# Altium schematic symbol library SM712PTCT.SchLib: 1 symbol
Pins are listed as number, name and electrical type; pins without a type are passive.

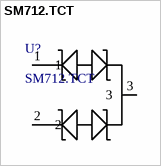
[diagram p0: symbol SM712.TCT]

## SM712.TCT
designator U?
Description; Manufacturer_Name: Semtech; Copyright: Copyright (C) 2025 Ultra Librarian. All rights reserved.; Manufacturer_Part_Number: SM712.TCT
footprint SOT23_SEM
pins: 1, 2, 3